# Altium schematic symbol library Vibration_Datalogger.SchLib: 75 symbols (part 6 of 7)
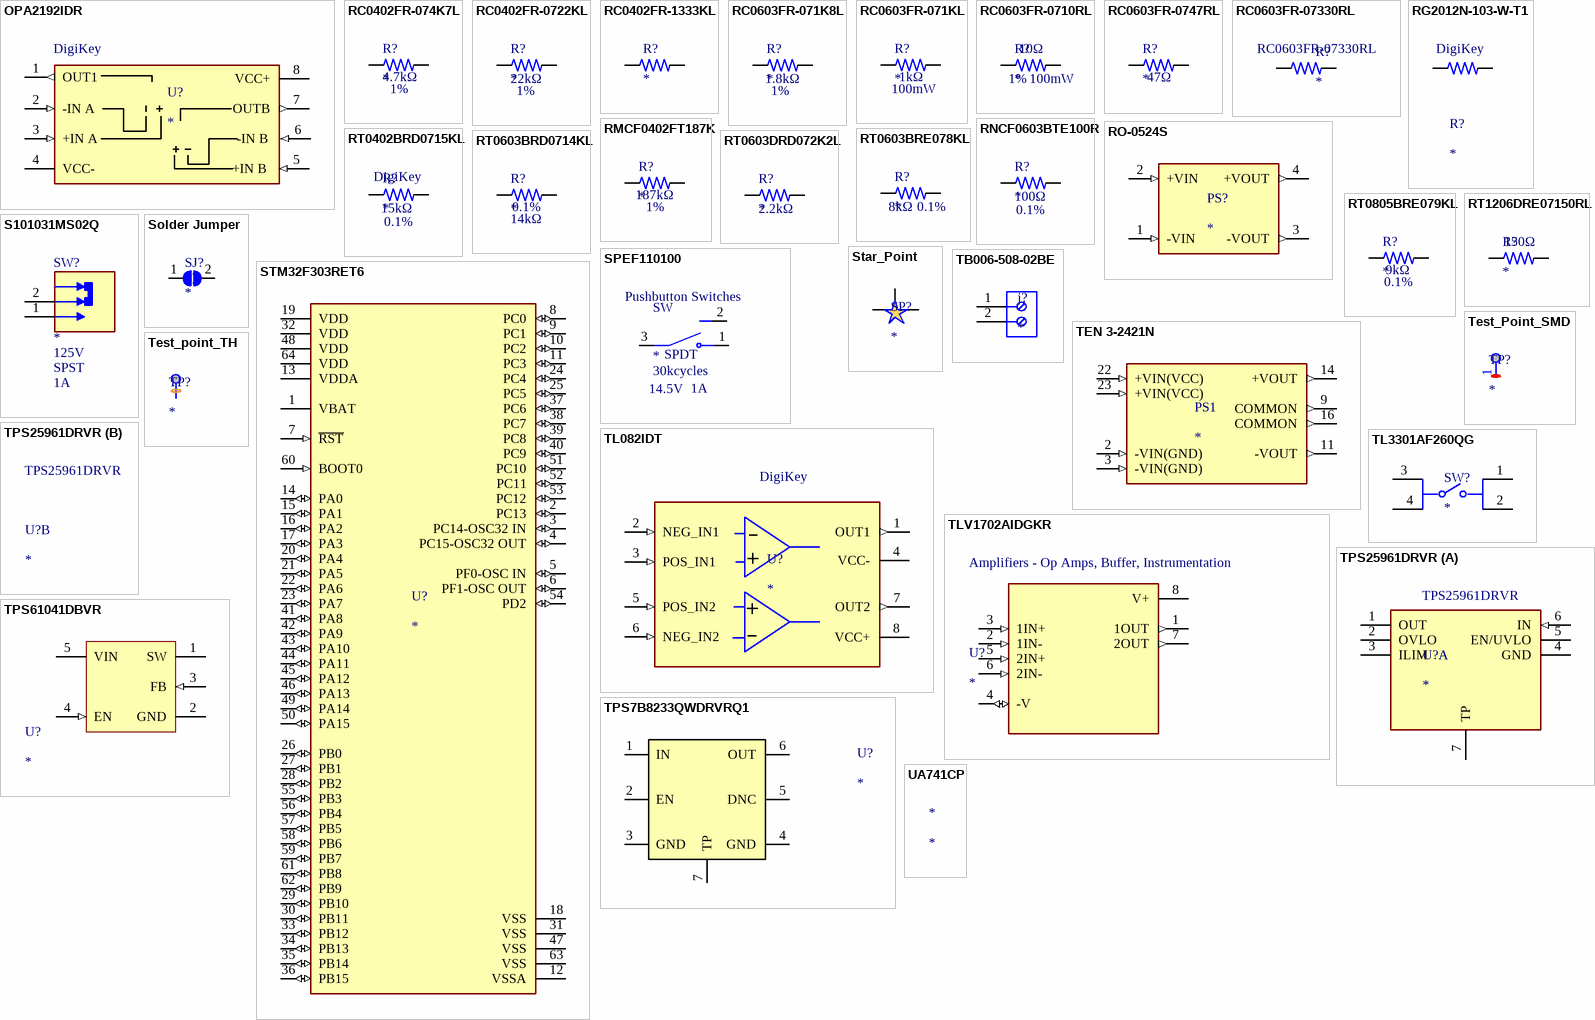
[diagram p6: symbols OPA2192IDR to UA741CP]

## RT0402BRD0715KL
designator R?  Resistance: 15kΩ  Tolerance: 0.1%  Supplier 1: DigiKey
RES SMD 15K OHM 0.1% 1/16W 0402; Max Power Dissipation: 63mW; Power Rating: 62.5mW; Temperature Coefficient: 25ppm/°C; Voltage Rating: 50V; Case/Package: 0402; Case Code (Imperial): 0402; China RoHS: Non-Compliant; Composition: Thin Film; Country of Origin: Mainland China; Depth: 500µm; Export Control Classification Number (ECCN) Code: EAR99; Features: Moisture Resistant; Height: 300µm; Harmonized Tariff Schedule (HTS) Code: 8533.21.00.30; Introduction Date: 2008-06-09; Lead Free: Lead Free; Length: 1mm; Lifecycle Status: Production; Max Operating Temperature: 155°C; Military Standard: Not; Min Operating Temperature: -55°C; Mount: Surface Mount; Number of Terminals: 2; Number of Terminations: 2; REACH SVHC: Yes; Schedule B: 8533210045, 8533210045|8533210045|8533210045|8533210045|8533210045; Termination: SMD/SMT; Voltage Rating (DC): 50V; Width: 500µm; Working Voltage: 50V; ComponentLink1URL: https://datasheet.octopart.com:443/RT0402BRD0715KL-Yageo-datasheet-176402239.pdf?src-supplier=Future+Electronics; ComponentLink1Description: https://datasheet.octopart.com:443/RT0402BRD0715KL-Yageo-datasheet-176402239.pdf?src-supplier=Future+Electronics; ComponentLink2URL: https://datasheet.octopart.com:443/RT0402BRD0715KL-Yageo-datasheet-169971040.pdf?src-supplier=Future+Electronics; ComponentLink2Description: https://datasheet.octopart.com:443/RT0402BRD0715KL-Yageo-datasheet-169971040.pdf?src-supplier=Future+Electronics; ComponentLink3URL: https://datasheet.octopart.com:443/RT0402BRD0715KL-Yageo-datasheet-166250672.pdf?src-supplier=Future+Electronics; ComponentLink3Description: https://datasheet.octopart.com:443/RT0402BRD0715KL-Yageo-datasheet-166250672.pdf?src-supplier=Future+Electronics; ComponentLink4URL: https://datasheet.octopart.com:443/RT0402BRD0715KL-Yageo-datasheet-136673517.pdf?src-supplier=Future+Electronics; ComponentLink4Description: https://datasheet.octopart.com:443/RT0402BRD0715KL-Yageo-datasheet-136673517.pdf?src-supplier=Future+Electronics; ComponentLink5URL: https://datasheet.octopart.com:443/RT0402BRD0715KL-Yageo-datasheet-137700930.pdf?src-supplier=Future+Electronics; ComponentLink5Description: https://datasheet.octopart.com:443/RT0402BRD0715KL-Yageo-datasheet-137700930.pdf?src-supplier=Future+Electronics; ComponentLink6URL: https://datasheet.octopart.com:443/RT0402BRD0715KL-Yageo-datasheet-41589729.pdf?src-supplier=Future+Electronics; ComponentLink6Description: https://datasheet.octopart.com:443/RT0402BRD0715KL-Yageo-datasheet-41589729.pdf?src-supplier=Future+Electronics; ComponentLink7URL: https://datasheet.octopart.com:443/RT0402BRD0715KL-Yageo-datasheet-12594463.pdf?src-supplier=Future+Electronics; ComponentLink7Description: https://datasheet.octopart.com:443/RT0402BRD0715KL-Yageo-datasheet-12594463.pdf?src-supplier=Future+Electronics; ComponentLink8URL: https://datasheet.octopart.com:443/RT0402BRD0715KL-Yageo-datasheet-10915759.pdf?src-supplier=Future+Electronics; ComponentLink8Description: https://datasheet.octopart.com:443/RT0402BRD0715KL-Yageo-datasheet-10915759.pdf?src-supplier=Future+Electronics; ComponentLink9URL: https://datasheet.octopart.com:443/RT0402BRD0715KL-Yageo-datasheet-34924148.pdf?src-supplier=Future+Electronics; ComponentLink9Description: https://datasheet.octopart.com:443/RT0402BRD0715KL-Yageo-datasheet-34924148.pdf?src-supplier=Future+Electronics; ComponentLink10URL: https://datasheet.octopart.com:443/RT0402BRD0715KL-Yageo-datasheet-96443642.pdf?src-supplier=Upverter; ComponentLink10Description: https://datasheet.octopart.com:443/RT0402BRD0715KL-Yageo-datasheet-96443642.pdf?src-supplier=Upverter; ComponentLink11URL: https://datasheet.octopart.com:443/RT0402BRD0715KL-Yageo-Group-datasheet-188167888.pdf?src-supplier=TME; ComponentLink11Description: https://datasheet.octopart.com:443/RT0402BRD0715KL-Yageo-Group-datasheet-188167888.pdf?src-supplier=TME; ComponentLink12URL: https://datasheet.octopart.com:443/RT0402BRD0715KL-Yageo-datasheet-164439670.pdf?src-supplier=Newark; ComponentLink12Description: https://datasheet.octopart.com:443/RT0402BRD0715KL-Yageo-datasheet-164439670.pdf?src-supplier=Newark; ComponentLink13URL: https://datasheet.octopart.com:443/RT0402BRD0715KL-Yageo-Group-datasheet-141265893.pdf?src-supplier=ODG+(Origin+Data+Global); ComponentLink13Description: https://datasheet.octopart.com:443/RT0402BRD0715KL-Yageo-Group-datasheet-141265893.pdf?src-supplier=ODG+(Origin+Data+Global); ComponentLink14URL: https://datasheet.octopart.com/RT0402BRD0715KL-Yageo-datasheet-86813807.pdf; ComponentLink14Description: https://datasheet.octopart.com/RT0402BRD0715KL-Yageo-datasheet-86813807.pdf; ComponentLink15URL: http://sigma.octopart.com:80/conflict_mineral_statement/Yageo-company-3.pdf?src-supplier=Compliance+Statements; ComponentLink15Description: http://sigma.octopart.com:80/conflict_mineral_statement/Yageo-company-3.pdf?src-supplier=Compliance+Statements; ComponentLink16URL: http://sigma.octopart.com:80/rohs_statement/Yageo-company-2.pdf?src-supplier=Compliance+Statements; ComponentLink16Description: http://sigma.octopart.com:80/rohs_statement/Yageo-company-2.pdf?src-supplier=Compliance+Statements
footprint RT0402BRD0715KL (RES SMD 15K OHM 0.1% 1/16W 0402)
pins: 1, 2

## RT0603BRD0714KL
designator R?  Tolerance: 0.1%  Resistance: 14kΩ
RES SMD 14K OHM 0.1% 1/10W 0603; Manufacturer: Yageo Group; Manufacturer Part Number: RT0603BRD0714KL; Max Power Dissipation: 100mW; Temperature Coefficient: 25ppm/°C; Voltage Rating: 75V; Voltage Rating (DC): 50V; Case/Package: 0603; Case Code (Imperial): 0603; China RoHS: Non-Compliant; Composition: Thin Film; Contact Plating: Tin; Country of Origin: Mainland China, Taiwan; Export Control Classification Number (ECCN) Code: EAR99; Features: Moisture Resistant; Height: 450µm; Harmonized Tariff Schedule (HTS) Code: 8533.21.00.30; Introduction Date: 2008-06-09; Lead Free: Lead Free; Length: 1.6mm; Lifecycle Status: Production; Max Operating Temperature: 155°C; Min Operating Temperature: -55°C; Mount: Surface Mount; Number of Terminals: 2; Number of Terminations: 2; Power Dissipation: 100mW; Power Rating: 100mW; Radiation Hardening: No; REACH SVHC: Yes; Schedule B: 8533210045, 8533210045|8533210045|8533210045|8533210045|8533210045; Termination: SMD/SMT; Width: 800µm; Working Voltage: 75V; ComponentLink1URL: https://datasheet.octopart.com:443/RT0603BRD0714KL-Yageo-datasheet-176402239.pdf?src-supplier=Future+Electronics; ComponentLink1Description: https://datasheet.octopart.com:443/RT0603BRD0714KL-Yageo-datasheet-176402239.pdf?src-supplier=Future+Electronics; ComponentLink2URL: https://datasheet.octopart.com:443/RT0603BRD0714KL-Yageo-datasheet-169971040.pdf?src-supplier=Future+Electronics; ComponentLink2Description: https://datasheet.octopart.com:443/RT0603BRD0714KL-Yageo-datasheet-169971040.pdf?src-supplier=Future+Electronics; ComponentLink3URL: https://datasheet.octopart.com:443/RT0603BRD0714KL-Yageo-datasheet-166250672.pdf?src-supplier=Future+Electronics; ComponentLink3Description: https://datasheet.octopart.com:443/RT0603BRD0714KL-Yageo-datasheet-166250672.pdf?src-supplier=Future+Electronics; ComponentLink4URL: https://datasheet.octopart.com:443/RT0603BRD0714KL-Yageo-datasheet-137700930.pdf?src-supplier=Future+Electronics; ComponentLink4Description: https://datasheet.octopart.com:443/RT0603BRD0714KL-Yageo-datasheet-137700930.pdf?src-supplier=Future+Electronics; ComponentLink5URL: https://datasheet.octopart.com:443/RT0603BRD0714KL-Yageo-datasheet-96443642.pdf?src-supplier=Upverter; ComponentLink5Description: https://datasheet.octopart.com:443/RT0603BRD0714KL-Yageo-datasheet-96443642.pdf?src-supplier=Upverter; ComponentLink6URL: https://datasheet.octopart.com:443/RT0603BRD0714KL-Yageo-Group-datasheet-188167888.pdf?src-supplier=TME; ComponentLink6Description: https://datasheet.octopart.com:443/RT0603BRD0714KL-Yageo-Group-datasheet-188167888.pdf?src-supplier=TME; ComponentLink7URL: https://datasheet.octopart.com/RT0603BRD0714KL-Yageo-datasheet-86813807.pdf; ComponentLink7Description: https://datasheet.octopart.com/RT0603BRD0714KL-Yageo-datasheet-86813807.pdf; ComponentLink8URL: http://sigma.octopart.com:80/conflict_mineral_statement/Yageo-company-3.pdf?src-supplier=Compliance+Statements; ComponentLink8Description: http://sigma.octopart.com:80/conflict_mineral_statement/Yageo-company-3.pdf?src-supplier=Compliance+Statements; ComponentLink9URL: http://sigma.octopart.com:80/rohs_statement/Yageo-company-2.pdf?src-supplier=Compliance+Statements; ComponentLink9Description: http://sigma.octopart.com:80/rohs_statement/Yageo-company-2.pdf?src-supplier=Compliance+Statements; Supplier 1: DigiKey; Supplier Part Number 1: YAG1531CT-ND; Category: Chip SMD Resistors
footprint RT0603BRD0714KL (RES SMD 14K OHM 0.1% 1/10W 0603)
pins: 1, 2

## RT0603BRE078KL
designator R?  Tolerance: 0.1%  Resistance: 8kΩ
RES SMD 8K OHM 0.1% 1/10W 0603; Manufacturer: Yageo Group; Manufacturer Part Number: RT0603BRE078KL; Max Power Dissipation: 100mW; Temperature Coefficient: 50ppm/°C; Voltage Rating: 75V; Case/Package: 0603; China RoHS: Non-Compliant; Composition: Thin Film; Features: Moisture Resistant; Height: 450µm; Length: 1.6mm; Lifecycle Status: Production; Max Operating Temperature: 155°C; Min Operating Temperature: -55°C; Mount: Surface Mount; Number of Terminals: 2; Number of Terminations: 2; Packaging: Tape & Reel; Power Dissipation: 100mW; Power Rating: 100mW; REACH SVHC: Yes; Width: 800µm; Working Voltage: 75V; ComponentLink1URL: https://datasheet.octopart.com:443/RT0603BRE078KL-Yageo-datasheet-176402239.pdf?src-supplier=IHS; ComponentLink1Description: https://datasheet.octopart.com:443/RT0603BRE078KL-Yageo-datasheet-176402239.pdf?src-supplier=IHS; ComponentLink2URL: https://datasheet.octopart.com:443/RT0603BRE078KL-Yageo-datasheet-137700930.pdf?src-supplier=IHS; ComponentLink2Description: https://datasheet.octopart.com:443/RT0603BRE078KL-Yageo-datasheet-137700930.pdf?src-supplier=IHS; ComponentLink3URL: https://datasheet.octopart.com:443/RT0603BRE078KL-Yageo-datasheet-169971040.pdf?src-supplier=Upverter; ComponentLink3Description: https://datasheet.octopart.com:443/RT0603BRE078KL-Yageo-datasheet-169971040.pdf?src-supplier=Upverter; ComponentLink4URL: https://sigma.octopart.com:443/138820526/technical_drawing/Yageo-RT0603BRE078KL.pdf?src-supplier=Upverter; ComponentLink4Description: https://sigma.octopart.com:443/138820526/technical_drawing/Yageo-RT0603BRE078KL.pdf?src-supplier=Upverter; ComponentLink5URL: https://datasheet.octopart.com:443/RT0603BRE078KL-Yageo-datasheet-164439670.pdf?src-supplier=Newark; ComponentLink5Description: https://datasheet.octopart.com:443/RT0603BRE078KL-Yageo-datasheet-164439670.pdf?src-supplier=Newark; ComponentLink6URL: https://datasheet.octopart.com/RT0603BRE078KL-Yageo-datasheet-86813807.pdf; ComponentLink6Description: https://datasheet.octopart.com/RT0603BRE078KL-Yageo-datasheet-86813807.pdf; ComponentLink7URL: http://sigma.octopart.com:80/conflict_mineral_statement/Yageo-company-3.pdf?src-supplier=Compliance+Statements; ComponentLink7Description: http://sigma.octopart.com:80/conflict_mineral_statement/Yageo-company-3.pdf?src-supplier=Compliance+Statements; ComponentLink8URL: http://sigma.octopart.com:80/rohs_statement/Yageo-company-2.pdf?src-supplier=Compliance+Statements; ComponentLink8Description: http://sigma.octopart.com:80/rohs_statement/Yageo-company-2.pdf?src-supplier=Compliance+Statements; Supplier 1: DigiKey; Supplier Part Number 1: 13-RT0603BRE078KLCT-ND; Category: Chip SMD Resistors
footprint RT0603BRE078KL (RES SMD 8K OHM 0.1% 1/10W 0603)
pins: 1, 2

## RT0603DRD072K2L
designator R?  Resistance: 2.2kΩ
RES SMD 2.2K OHM 0.5% 1/10W 0603; Manufacturer: Yageo Group; Manufacturer Part Number: RT0603DRD072K2L; Max Power Dissipation: 100mW; Temperature Coefficient: 25ppm/°C; Voltage Rating: 75V; Voltage Rating (DC): 50V; Case/Package: 0603; Case Code (Imperial): 0603; China RoHS: Non-Compliant; Composition: Thin Film; Features: Moisture Resistant; Height: 450µm; Lead Free: Lead Free; Length: 1.6mm; Lifecycle Status: Production; Max Operating Temperature: 155°C; Min Operating Temperature: -55°C; Mount: Surface Mount; Number of Terminals: 2; Number of Terminations: 2; Power Dissipation: 100mW; Power Rating: 100mW; REACH SVHC: Yes; Schedule B: 8533210045, 8533210045|8533210045, 8533210045|8533210045|8533210045, 8533210045|8533210045|8533210045|8533210045; Tolerance: 0.5%; Width: 800µm; Working Voltage: 75V; ComponentLink1URL: https://datasheet.octopart.com:443/RT0603DRD072K2L-Yageo-datasheet-176402239.pdf?src-supplier=Newark; ComponentLink1Description: https://datasheet.octopart.com:443/RT0603DRD072K2L-Yageo-datasheet-176402239.pdf?src-supplier=Newark; ComponentLink2URL: https://datasheet.octopart.com:443/RT0603DRD072K2L-Yageo-datasheet-96443642.pdf?src-supplier=Upverter; ComponentLink2Description: https://datasheet.octopart.com:443/RT0603DRD072K2L-Yageo-datasheet-96443642.pdf?src-supplier=Upverter; ComponentLink3URL: https://datasheet.octopart.com:443/RT0603DRD072K2L-Yageo-Group-datasheet-141265893.pdf?src-supplier=ODG+(Origin+Data+Global); ComponentLink3Description: https://datasheet.octopart.com:443/RT0603DRD072K2L-Yageo-Group-datasheet-141265893.pdf?src-supplier=ODG+(Origin+Data+Global); ComponentLink4URL: https://datasheet.octopart.com:443/RT0603DRD072K2L-Yageo-datasheet-68361100.pdf?src-supplier=Future+Electronics; ComponentLink4Description: https://datasheet.octopart.com:443/RT0603DRD072K2L-Yageo-datasheet-68361100.pdf?src-supplier=Future+Electronics; ComponentLink5URL: https://datasheet.octopart.com:443/RT0603DRD072K2L-Yageo-datasheet-41589729.pdf?src-supplier=Future+Electronics; ComponentLink5Description: https://datasheet.octopart.com:443/RT0603DRD072K2L-Yageo-datasheet-41589729.pdf?src-supplier=Future+Electronics; ComponentLink6URL: https://datasheet.octopart.com:443/RT0603DRD072K2L-Yageo-datasheet-12594463.pdf?src-supplier=Future+Electronics; ComponentLink6Description: https://datasheet.octopart.com:443/RT0603DRD072K2L-Yageo-datasheet-12594463.pdf?src-supplier=Future+Electronics; ComponentLink7URL: https://datasheet.octopart.com:443/RT0603DRD072K2L-Yageo-datasheet-34924148.pdf?src-supplier=Future+Electronics; ComponentLink7Description: https://datasheet.octopart.com:443/RT0603DRD072K2L-Yageo-datasheet-34924148.pdf?src-supplier=Future+Electronics; ComponentLink8URL: https://datasheet.octopart.com/RT0603DRD072K2L-Yageo-datasheet-86813807.pdf; ComponentLink8Description: https://datasheet.octopart.com/RT0603DRD072K2L-Yageo-datasheet-86813807.pdf; ComponentLink9URL: http://sigma.octopart.com:80/conflict_mineral_statement/Yageo-company-3.pdf?src-supplier=Compliance+Statements; ComponentLink9Description: http://sigma.octopart.com:80/conflict_mineral_statement/Yageo-company-3.pdf?src-supplier=Compliance+Statements; ComponentLink10URL: http://sigma.octopart.com:80/rohs_statement/Yageo-company-2.pdf?src-supplier=Compliance+Statements; ComponentLink10Description: http://sigma.octopart.com:80/rohs_statement/Yageo-company-2.pdf?src-supplier=Compliance+Statements; Supplier 1: DigiKey; Supplier Part Number 1: 311-2.2KDCT-ND; Category: Chip SMD Resistors
footprint RT0603DRD072K2L (RES SMD 2.2K OHM 0.5% 1/10W 0603)
pins: 1, 2

## RT0805BRE079KL
designator R?  Tolerance: 0.1%  Resistance: 9kΩ
RES SMD 9K OHM 0.1% 1/8W 0805; Manufacturer: Yageo Group; Manufacturer Part Number: RT0805BRE079KL; Max Power Dissipation: 125mW; Temperature Coefficient: 50ppm/°C; Working Voltage: 150V; Case/Package: 0805; China RoHS: Non-Compliant; Composition: Thin Film; Country of Origin: Mainland China, Taiwan; Export Control Classification Number (ECCN) Code: EAR99; Features: Moisture Resistant; Height: 609.6µm; Harmonized Tariff Schedule (HTS) Code: 8533.21.00.30; Introduction Date: 2017-09-12; Length: 2.0066mm; Lifecycle Status: Production; Max Operating Temperature: 155°C; Min Operating Temperature: -55°C; Mount: Surface Mount; Number of Terminals: 2; Number of Terminations: 2; Packaging: Tape & Reel; Power Dissipation: 125mW; REACH SVHC: Yes; Width: 1.2446mm; ComponentLink1URL: https://datasheet.octopart.com:443/RT0805BRE079KL-Yageo-datasheet-96443642.pdf?src-supplier=IHS; ComponentLink1Description: https://datasheet.octopart.com:443/RT0805BRE079KL-Yageo-datasheet-96443642.pdf?src-supplier=IHS; ComponentLink2URL: https://datasheet.octopart.com:443/RT0805BRE079KL-Yageo-datasheet-176402239.pdf?src-supplier=Future+Electronics; ComponentLink2Description: https://datasheet.octopart.com:443/RT0805BRE079KL-Yageo-datasheet-176402239.pdf?src-supplier=Future+Electronics; ComponentLink3URL: https://datasheet.octopart.com:443/RT0805BRE079KL-Yageo-datasheet-169971040.pdf?src-supplier=Future+Electronics; ComponentLink3Description: https://datasheet.octopart.com:443/RT0805BRE079KL-Yageo-datasheet-169971040.pdf?src-supplier=Future+Electronics; ComponentLink4URL: https://datasheet.octopart.com:443/RT0805BRE079KL-Yageo-datasheet-164439670.pdf?src-supplier=Future+Electronics; ComponentLink4Description: https://datasheet.octopart.com:443/RT0805BRE079KL-Yageo-datasheet-164439670.pdf?src-supplier=Future+Electronics; ComponentLink5URL: https://datasheet.octopart.com:443/RT0805BRE079KL-Yageo-Group-datasheet-141265893.pdf?src-supplier=ODG+(Origin+Data+Global); ComponentLink5Description: https://datasheet.octopart.com:443/RT0805BRE079KL-Yageo-Group-datasheet-141265893.pdf?src-supplier=ODG+(Origin+Data+Global); ComponentLink6URL: https://datasheet.octopart.com/RT0805BRE079KL-Yageo-datasheet-86813807.pdf; ComponentLink6Description: https://datasheet.octopart.com/RT0805BRE079KL-Yageo-datasheet-86813807.pdf; ComponentLink7URL: http://sigma.octopart.com:80/conflict_mineral_statement/Yageo-company-3.pdf?src-supplier=Compliance+Statements; ComponentLink7Description: http://sigma.octopart.com:80/conflict_mineral_statement/Yageo-company-3.pdf?src-supplier=Compliance+Statements; ComponentLink8URL: http://sigma.octopart.com:80/rohs_statement/Yageo-company-2.pdf?src-supplier=Compliance+Statements; ComponentLink8Description: http://sigma.octopart.com:80/rohs_statement/Yageo-company-2.pdf?src-supplier=Compliance+Statements; Supplier 1: DigiKey; Supplier Part Number 1: 13-RT0805BRE079KLCT-ND; Category: Chip SMD Resistors
footprint RT0805BRE079KL (RES SMD 9K OHM 0.1% 1/8W 0805)
pins: 1, 2

## RT1206DRE07150RL
designator R?  Resistance: 150Ω
RES SMD 150 OHM 0.5% 1/4W 1206; Manufacturer: Yageo Group; Manufacturer Part Number: RT1206DRE07150RL; Max Power Dissipation: 250mW; Temperature Coefficient: 50ppm/°C; Voltage Rating: 200V; Case/Package: 1206; Case Code (Imperial): 1206; Case Code (Metric): 3216; China RoHS: Non-Compliant; Composition: Thin Film; Depth: 1.6mm; Features: Moisture Resistant; Height: 550µm; Lead Free: Lead Free; Length: 3.1mm; Lifecycle Status: Production; Max Operating Temperature: 155°C; Military Standard: Not; Min Operating Temperature: -55°C; Mount: Surface Mount; Number of Terminals: 2; Number of Terminations: 2; Packaging: Tape & Reel (TR); Power Dissipation: 250mW; Power Rating: 250mW; REACH SVHC: Yes; Tolerance: 0.5%; Voltage Rating (DC): 200V; Width: 1.6mm; Working Voltage: 200V; ComponentLink1URL: https://datasheet.octopart.com:443/RT1206DRE07150RL-Yageo-datasheet-176402239.pdf?src-supplier=Newark; ComponentLink1Description: https://datasheet.octopart.com:443/RT1206DRE07150RL-Yageo-datasheet-176402239.pdf?src-supplier=Newark; ComponentLink2URL: https://datasheet.octopart.com:443/RT1206DRE07150RL-Yageo-datasheet-96443642.pdf?src-supplier=Upverter; ComponentLink2Description: https://datasheet.octopart.com:443/RT1206DRE07150RL-Yageo-datasheet-96443642.pdf?src-supplier=Upverter; ComponentLink3URL: https://datasheet.octopart.com/RT1206DRE07150RL-Yageo-datasheet-86813807.pdf; ComponentLink3Description: https://datasheet.octopart.com/RT1206DRE07150RL-Yageo-datasheet-86813807.pdf; ComponentLink4URL: http://sigma.octopart.com:80/conflict_mineral_statement/Yageo-company-3.pdf?src-supplier=Compliance+Statements; ComponentLink4Description: http://sigma.octopart.com:80/conflict_mineral_statement/Yageo-company-3.pdf?src-supplier=Compliance+Statements; ComponentLink5URL: http://sigma.octopart.com:80/rohs_statement/Yageo-company-2.pdf?src-supplier=Compliance+Statements; ComponentLink5Description: http://sigma.octopart.com:80/rohs_statement/Yageo-company-2.pdf?src-supplier=Compliance+Statements; Supplier 1: DigiKey; Supplier Part Number 1: 311-2965-1-ND; Category: Chip SMD Resistors
footprint RT1206DRE07150RL (RES SMD 150 OHM 0.5% 1/4W 1206)
pins: 1, 2

## S101031MS02Q
designator SW?  Max Voltage Rating (DC): 125V  Throw Configuration: SPST  Current Rating: 1A
Commutateurs à glissière SPST 6A PC TH AG; Manufacturer: C&K Components; Manufacturer Part Number: S101031MS02Q; Actuator Length: 8.51mm; Actuator Material: Nylon, Polyamide; Contact Voltage Rating (AC): 250V; Electrical Life: 10kcycles; Number of Positions: 1; Switch Function: On-Off; Switch Travel: 4.57mm; Contact Current Rating: 6A; Contact Material: Copper; Contact Plating: Silver; Country of Origin: Vietnam; Depth: 13.46mm; Export Control Classification Number (ECCN) Code: EAR99; Flammability Rating: UL94 V-2; Height: 7.11mm; Housing Material: Nylon; Harmonized Tariff Schedule (HTS) Code: 8536.50.90.50; Introduction Date: 2006-08-10; Length: 22.99mm; Lifecycle Status: Production; Max Current Rating: 1A; Max Operating Temperature: 65°C; Max Voltage Rating (AC): 250V; Min Operating Temperature: -30°C; Mount: Through Hole; REACH SVHC: Yes; Schedule B: 8536509050; Termination: Solder; Voltage Rating (AC): 125V; Voltage Rating (DC): 125V; ComponentLink1URL: https://datasheet.octopart.com:443/S101031MS02Q-C%26K-Components-datasheet-62111176.pdf?src-supplier=IHS; ComponentLink1Description: https://datasheet.octopart.com:443/S101031MS02Q-C%26K-Components-datasheet-62111176.pdf?src-supplier=IHS; ComponentLink2URL: https://datasheet.octopart.com:443/S101031MS02Q-C%26K-Components-datasheet-155330770.pdf?src-supplier=IHS; ComponentLink2Description: https://datasheet.octopart.com:443/S101031MS02Q-C%26K-Components-datasheet-155330770.pdf?src-supplier=IHS; ComponentLink3URL: https://datasheet.octopart.com:443/S101031MS02Q-ITT---Cannon-datasheet-123530.pdf?src-supplier=IHS; ComponentLink3Description: https://datasheet.octopart.com:443/S101031MS02Q-ITT---Cannon-datasheet-123530.pdf?src-supplier=IHS; ComponentLink4URL: https://datasheet.octopart.com:443/S101031MS02Q-C%26K-Components-datasheet-150821960.pdf?src-supplier=Sager+Electronics; ComponentLink4Description: https://datasheet.octopart.com:443/S101031MS02Q-C%26K-Components-datasheet-150821960.pdf?src-supplier=Sager+Electronics; ComponentLink5URL: https://datasheet.octopart.com:443/S101031MS02Q-C%26K-Components-datasheet-17018678.pdf?src-supplier=Electro+Sonic; ComponentLink5Description: https://datasheet.octopart.com:443/S101031MS02Q-C%26K-Components-datasheet-17018678.pdf?src-supplier=Electro+Sonic; ComponentLink6URL: https://datasheet.octopart.com:443/S101031MS02Q-C%26K-Components-datasheet-11546994.pdf?src-supplier=_legacy+Avnet; ComponentLink6Description: https://datasheet.octopart.com:443/S101031MS02Q-C%26K-Components-datasheet-11546994.pdf?src-supplier=_legacy+Avnet; ComponentLink7URL: http://sigma.octopart.com:80/reach_statement/ITT-company-18.pdf?src-supplier=Compliance+Statements; ComponentLink7Description: http://sigma.octopart.com:80/reach_statement/ITT-company-18.pdf?src-supplier=Compliance+Statements; Supplier 1: DigiKey; Supplier Part Number 1: CKN10658-ND; Category: Slide Switches
footprint S101031MS02Q (Commutateurs à glissière SPST 6A PC TH AG)
pins: 1, 2

## Solder Jumper
designator SJ?  (no BOM)
footprint Solder Jumper
pins: 1 SJ1, 2 SJ2

## SPEF110100
designator SW  Electrical Life: 30kcycles  Voltage Rating (DC): 14.5V  Throw Configuration: SPDT  Current Rating: 1A  Category: Pushbutton Switches
Switch Push Button N.O./N.C. SPDT Square Plunger 1A 14.5VDC Latching Bracket Mount/Through Hole PC Pins Automotive Bulk; Manufacturer: ALPS; Manufacturer Part Number: SPEF110100; Actuator Length: 5.0038mm; Contact Resistance: 100mΩ; Insulation Resistance: 3MΩ; Operating Force: 3N; Voltage Rating (AC): 100V; Export Control Classification Number (ECCN) Code: EAR99; Height: 6.9mm; Harmonized Tariff Schedule (HTS) Code: 8536.50.70.00; Introduction Date: 2015-04-16; Length: 9.398mm; Lifecycle Status: Production; Max Current Rating: 1A; Max Operating Temperature: 85°C; Max Voltage Rating (DC): 14.5V; Min Operating Temperature: -40°C; Mount: Bushing; Radiation Hardening: No; Termination: Solder; ComponentLink1URL: https://datasheet.octopart.com:443/SPEF110100-ALPS-datasheet-182234832.pdf?src-supplier=IHS; ComponentLink1Description: https://datasheet.octopart.com:443/SPEF110100-ALPS-datasheet-182234832.pdf?src-supplier=IHS; ComponentLink2URL: https://datasheet.octopart.com:443/SPEF110100-ALPS-datasheet-182235328.pdf?src-supplier=IHS; ComponentLink2Description: https://datasheet.octopart.com:443/SPEF110100-ALPS-datasheet-182235328.pdf?src-supplier=IHS; Supplier 1: Mouser; Supplier Part Number 1: 688-SPEF110100
footprint SPEF110100 (1.5mm-travel Vertical Type SPEF Series)
pins: 1, 2, 3 c

## Star_Point
designator SP?
Star Point , permet de relier plusieurs masse à une seule
footprint Star_Point
pins: 1, 2, 3

## STM32F303RET6
designator U?
IC MCU 32BIT 512KB FLASH 64LQFP; Manufacturer: STMicroelectronics; Manufacturer Part Number: STM32F303RET6; ADC Channels (Resolution): 22-Ch 12-Bit; Core Architecture: ARM Cortex-M4; DAC Channels (Resolution): 2-Ch 12-Bit; Data Bus Width: 32b; EEPROM Memory Size: 0B; Frequency: 72MHz; Interface: CAN, IrDA, LIN, SMBus, USB; Max Frequency: 32MHz; Max Junction Temperature (Tj): 105°C; Max Supply Current: 76.9mA; Max Supply Voltage: 3.6V; Min Supply Voltage: 2V; Nominal Supply Current: 2µA; Number of A/D Converters: 4; Number of ADC Channels: 22; Number of D/A Converters: 2; Number of I2C Channels: 3; Number of I/Os: 51; Number of PWM Channels: 31; Number of Timers/Counters: 1; Operating Supply Voltage: 3.3V; Oscillator Type: Internal; Peripherals: POR; RAM Size: 64kB; Description: MCU 32-bit ARM Cortex M4 RISC 512KB Flash 2.5V/3.3V 64-Pin LQFP Frame; Ambient Temperature Range High: 85°C; Case/Package: LFQFP; China RoHS: Compliant; Country of Origin: Mainland China; Export Control Classification Number (ECCN) Code: 3A991.A.2; Flash Memory Size: 512kB; Height: 1.6mm; Height - Seated (Max): 1.6mm; Harmonized Tariff Schedule (HTS) Code: 8542.31.00.25; Introduction Date: 2015-03-03; Lead Free: Lead Free; Length: 10mm; Lifecycle Status: Production; Max Operating Temperature: 85°C; Memory Size: 512kB; Memory Type: FLASH; Min Operating Temperature: -40°C; Mount: Surface Mount; Number of Channels: 22; Number of Pins: 64; Number of SPI Channels: 3; Number of Terminals: 64; Number of UART Channels: 2; Number of USART Channels: 3; Number of USB Channels: 1; REACH SVHC: Yes; Schedule B: 8542310000; Temperature Grade: Industrial; Terminal Pitch: 500µm; Weight: 342.689036mg; Width: 10mm; ComponentLink1URL: https://datasheet.octopart.com:443/STM32F303RET6-STMicroelectronics-datasheet-68303033.pdf?src-supplier=IHS; ComponentLink1Description: https://datasheet.octopart.com:443/STM32F303RET6-STMicroelectronics-datasheet-68303033.pdf?src-supplier=IHS; ComponentLink2URL: https://datasheet.octopart.com:443/STM32F303RET6-STMicroelectronics-datasheet-61689937.pdf?src-supplier=STMicroelectronics; ComponentLink2Description: https://datasheet.octopart.com:443/STM32F303RET6-STMicroelectronics-datasheet-61689937.pdf?src-supplier=STMicroelectronics; ComponentLink3URL: https://datasheet.octopart.com:443/STM32F303RET6-STMicroelectronics-datasheet-37090231.pdf?src-supplier=STMicroelectronics; ComponentLink3Description: https://datasheet.octopart.com:443/STM32F303RET6-STMicroelectronics-datasheet-37090231.pdf?src-supplier=STMicroelectronics; ComponentLink4URL: https://datasheet.octopart.com:443/STM32F303RET6-STMicroelectronics-datasheet-43912984.pdf?src-supplier=element14+APAC; ComponentLink4Description: https://datasheet.octopart.com:443/STM32F303RET6-STMicroelectronics-datasheet-43912984.pdf?src-supplier=element14+APAC; ComponentLink5URL: https://datasheet.octopart.com:443/STM32F303RET6-STMicroelectronics-datasheet-37697013.pdf?src-supplier=Newark; ComponentLink5Description: https://datasheet.octopart.com:443/STM32F303RET6-STMicroelectronics-datasheet-37697013.pdf?src-supplier=Newark; ComponentLink6URL: https://datasheet.octopart.com:443/STM32F303RET6-STMicroelectronics-datasheet-37143350.pdf?src-supplier=Farnell; ComponentLink6Description: https://datasheet.octopart.com:443/STM32F303RET6-STMicroelectronics-datasheet-37143350.pdf?src-supplier=Farnell; ComponentLink7URL: https://datasheet.octopart.com:443/STM32F303RET6-STMicroelectronics-datasheet-136987017.pdf?src-supplier=TME; ComponentLink7Description: https://datasheet.octopart.com:443/STM32F303RET6-STMicroelectronics-datasheet-136987017.pdf?src-supplier=TME; Category: Microcontrollers; Nominal Supply Voltage (DC): 3.3V; Supplier 1: DigiKey; Supplier Part Number 1: 497-15163-ND
footprint STM32F303RET6
pins: 1 VBAT (power), 2 PC13 (io), 3 PC14-OSC32 IN (io), 4 PC15-OSC32 OUT (io), 5 PF0-OSC IN (io), 6 PF1-OSC OUT (io), 7 ~{RST} (in), 8 PC0 (io), 9 PC1 (io), 10 PC2 (io), 11 PC3 (io), 12 VSSA (power), 13 VDDA (power), 14 PA0 (io), 15 PA1 (io), 16 PA2 (io), 17 PA3 (io), 18 VSS (power), 19 VDD (power), 20 PA4 (io), 21 PA5 (io), 22 PA6 (io), 23 PA7 (io), 24 PC4 (io), 25 PC5 (io), 26 PB0 (io), 27 PB1 (io), 28 PB2 (io), 29 PB10 (io), 30 PB11 (io), 31 VSS (power), 32 VDD (power), 33 PB12 (io), 34 PB13 (io), 35 PB14 (io), 36 PB15 (io), 37 PC6 (io), 38 PC7 (io), 39 PC8 (io), 40 PC9 (io), 41 PA8 (io), 42 PA9 (io), 43 PA10 (io), 44 PA11 (io), 45 PA12 (io), 46 PA13 (io), 47 VSS (power), 48 VDD (power), 49 PA14 (io), 50 PA15 (io), 51 PC10 (io), 52 PC11 (io), 53 PC12 (io), 54 PD2 (io), 55 PB3 (io), 56 PB4 (io), 57 PB5 (io), 58 PB6 (io), 59 PB7 (io), 60 BOOT0 (in), 61 PB8 (io), 62 PB9 (io), 63 VSS (power), 64 VDD (power)

## TB006-508-02BE
designator j?
TERMINAL BLOCK, SCREW TYPE, 5.08; Manufacturer: Same Sky; Manufacturer Part Number: TB006-508-02BE; Approvals: CE, EN, IEC, UL, cUL; Current Rating: 12A; Number of Contacts: 2; Number of Levels: 1; Pitch: 5.08mm; Voltage Rating: 300V; Wire/Cable Gauge: 14AWG; Color: Blue; Export Control Classification Number (ECCN) Code: EAR99; Height: 10mm; Harmonized Tariff Schedule (HTS) Code: 8536.90.40.00; Introduction Date: 2024-10-09; Lifecycle Status: Production; Max Operating Temperature: 105°C; Min Operating Temperature: -40°C; Mount: Screw; Number of Rows: 1; Orientation: Horizontal; Width: 8.2mm; ComponentLink1URL: https://datasheet.octopart.com:443/TB006-508-02BE-Same-Sky-datasheet-181920258.pdf?src-supplier=Same+Sky; ComponentLink1Description: https://datasheet.octopart.com:443/TB006-508-02BE-Same-Sky-datasheet-181920258.pdf?src-supplier=Same+Sky; ComponentLink2URL: https://datasheet.octopart.com:443/TB006-508-02BE-CUI-Devices-datasheet-175928139.pdf?src-supplier=Same+Sky; ComponentLink2Description: https://datasheet.octopart.com:443/TB006-508-02BE-CUI-Devices-datasheet-175928139.pdf?src-supplier=Same+Sky; ComponentLink3URL: https://datasheet.octopart.com:443/TB006-508-02BE-CUI-Devices-datasheet-144794960.pdf?src-supplier=Same+Sky; ComponentLink3Description: https://datasheet.octopart.com:443/TB006-508-02BE-CUI-Devices-datasheet-144794960.pdf?src-supplier=Same+Sky; ComponentLink4URL: https://datasheet.octopart.com:443/TB006-508-02BE-CUI-Devices-datasheet-180438495.pdf?src-supplier=IHS; ComponentLink4Description: https://datasheet.octopart.com:443/TB006-508-02BE-CUI-Devices-datasheet-180438495.pdf?src-supplier=IHS; ComponentLink5URL: https://datasheet.octopart.com:443/TB006-508-02BE-Same-Sky-datasheet-182881446.pdf?src-supplier=Electro+Sonic; ComponentLink5Description: https://datasheet.octopart.com:443/TB006-508-02BE-Same-Sky-datasheet-182881446.pdf?src-supplier=Electro+Sonic; ComponentLink6URL: https://datasheet.octopart.com:443/TB006-508-02BE-CUI-Devices-datasheet-154730747.pdf?src-supplier=Electro+Sonic; ComponentLink6Description: https://datasheet.octopart.com:443/TB006-508-02BE-CUI-Devices-datasheet-154730747.pdf?src-supplier=Electro+Sonic; ComponentLink7URL: https://datasheet.octopart.com:443/TB006-508-02BE-CUI-Devices-datasheet-175927972.pdf?src-supplier=CUI+Devices+SCT; ComponentLink7Description: https://datasheet.octopart.com:443/TB006-508-02BE-CUI-Devices-datasheet-175927972.pdf?src-supplier=CUI+Devices+SCT; ComponentLink8URL: https://datasheet.octopart.com:443/TB006-508-02BE-CUI-Devices-datasheet-142371922.pdf?src-supplier=Future+Electronics; ComponentLink8Description: https://datasheet.octopart.com:443/TB006-508-02BE-CUI-Devices-datasheet-142371922.pdf?src-supplier=Future+Electronics; ComponentLink9URL: https://datasheet.octopart.com:443/TB006-508-02BE-Same-Sky-datasheet-182050254.pdf?src-supplier=Future+Electronics; ComponentLink9Description: https://datasheet.octopart.com:443/TB006-508-02BE-Same-Sky-datasheet-182050254.pdf?src-supplier=Future+Electronics; ComponentLink10URL: https://datasheet.octopart.com:443/TB006-508-02BE-CUI-Devices-datasheet-175928504.pdf?src-supplier=Future+Electronics; ComponentLink10Description: https://datasheet.octopart.com:443/TB006-508-02BE-CUI-Devices-datasheet-175928504.pdf?src-supplier=Future+Electronics; ComponentLink11URL: https://datasheet.octopart.com:443/TB006-508-02BE-CUI-Devices-datasheet-147843966.pdf?src-supplier=Future+Electronics; ComponentLink11Description: https://datasheet.octopart.com:443/TB006-508-02BE-CUI-Devices-datasheet-147843966.pdf?src-supplier=Future+Electronics; ComponentLink12URL: https://datasheet.octopart.com:443/TB006-508-02BE-Same-Sky-datasheet-189105716.pdf?src-supplier=Master+Electronics; ComponentLink12Description: https://datasheet.octopart.com:443/TB006-508-02BE-Same-Sky-datasheet-189105716.pdf?src-supplier=Master+Electronics; ComponentLink13URL: https://octopart.com:443/opatz8j6/c1?t=eFP0t1yMaer5fqXOBA3T788EVBF2GhNaKgPx7eLDiSRWPs3i5FaaEo9hjRkJ1KR7kDo8Aa7uuq8_Hr5VZR8Kf-2nnqYIqREL74NJxUI33P7zlikLvuxbkgHx79VDMbjJjpU6XCJoSZDxyAndI7ChSK84purJZaZgHBoRoP8ZZ4ejXKJg6DiAz0h3Ggok9yr3JUod9PbTgV5Rq2Jkm_jGnl78MRGghpRZ-ERHe9DeJK7A1iftOrnJV_vershSpBy0ctayIIa2UmSCv67YDiY1De6DPgqIHqtcEQA3m7sIllNhj54H4f6Zx-9HD44VkeGfU_qseDbAq9PtnEfUcVX03lqslG2liGjIG-ou_fIA&src-supplier=Compliance+Statements; ComponentLink13Description: https://octopart.com:443/opatz8j6/c1?t=eFP0t1yMaer5fqXOBA3T788EVBF2GhNaKgPx7eLDiSRWPs3i5FaaEo9hjRkJ1KR7kDo8Aa7uuq8_Hr5VZR8Kf-2nnqYIqREL74NJxUI33P7zlikLvuxbkgHx79VDMbjJjpU6XCJoSZDxyAndI7ChSK84purJZaZgHBoRoP8ZZ4ejXKJg6DiAz0h3Ggok9yr3JUod9PbTgV5Rq2Jkm_jGnl78MRGghpRZ-ERHe9DeJK7A1iftOrnJV_vershSpBy0ctayIIa2UmSCv67YDiY1De6DPgqIHqtcEQA3m7sIllNhj54H4f6Zx-9HD44VkeGfU_qseDbAq9PtnEfUcVX03lqslG2liGjIG-ou_fIA&src-supplier=Compliance+Statements; ComponentLink14URL: https://octopart.com:443/opatz8j6/c1?t=eQXU25om79Mg7i_sc7vmaQUPv77M4JGPhOFRWgBv8hLO2y81gGWxbNJlsyCNOqNxLkqNphBztY6g9-w_FHlTwXYeR5ap3gbLgvssa-HqjKraM2eE-5AhTbcjk8cwv8McGs54kCOyk22YrOjspopvLulwE37c-kDx3_f-_RG9iEILM8oD-c7KhExr9da662TLQ3QDoM-_4-8eYMZVAy8bjOPw4Fmix2vZEkLfqUoFkFCxzXVk7oooo-keoqirMZele-W4jTsBOJG7FqCEoN-gSw8YJblTVjAtO0RSLFxf1XIgLH-qeC1H0fXxg3YlDl_jUtLLeJKXoe-V1xQQIpOocKGOlGAArD2oY9MfPdlkCPJ5dg&src-supplier=Compliance+Statements; ComponentLink14Description: https://octopart.com:443/opatz8j6/c1?t=eQXU25om79Mg7i_sc7vmaQUPv77M4JGPhOFRWgBv8hLO2y81gGWxbNJlsyCNOqNxLkqNphBztY6g9-w_FHlTwXYeR5ap3gbLgvssa-HqjKraM2eE-5AhTbcjk8cwv8McGs54kCOyk22YrOjspopvLulwE37c-kDx3_f-_RG9iEILM8oD-c7KhExr9da662TLQ3QDoM-_4-8eYMZVAy8bjOPw4Fmix2vZEkLfqUoFkFCxzXVk7oooo-keoqirMZele-W4jTsBOJG7FqCEoN-gSw8YJblTVjAtO0RSLFxf1XIgLH-qeC1H0fXxg3YlDl_jUtLLeJKXoe-V1xQQIpOocKGOlGAArD2oY9MfPdlkCPJ5dg&src-supplier=Compliance+Statements; ComponentLink15URL: https://octopart.com:443/opatz8j6/c1?t=wRmJeZsFFpgldaQkFQEDz9TSai1lhMJuCHXTj1jyRUN-8JflpGK8oe4bKLGF3HD-Pdyt_Tc6CN9GVb85udjq_tMu_zS_j5OYSqy_wUeKJPdlntQAS2h7Si8Hm3IldBLwvHyMXDQjjbPMTvS_IO7RCPy3bp7-NW2cEdzDq6Q_MlsFxP0xiGuiAbjOvgNtQ26tRMImPOwgInzz_ugkJ9p-YHxRQulE3iOIBNFRa4_A23rOY7N1d6yeZsFvFpuV24PXxnWZBUCPW8MQcoPWcw1zc9AcnasklS4kkMraZ_BPS8oJxNtpmk2RcySc8Yyv1lg1JJ3xzOJ7g3ouVZnU97WDAVEmoYsAJFib10Krj5Ss&src-supplier=Compliance+Statements; ComponentLink15Description: https://octopart.com:443/opatz8j6/c1?t=wRmJeZsFFpgldaQkFQEDz9TSai1lhMJuCHXTj1jyRUN-8JflpGK8oe4bKLGF3HD-Pdyt_Tc6CN9GVb85udjq_tMu_zS_j5OYSqy_wUeKJPdlntQAS2h7Si8Hm3IldBLwvHyMXDQjjbPMTvS_IO7RCPy3bp7-NW2cEdzDq6Q_MlsFxP0xiGuiAbjOvgNtQ26tRMImPOwgInzz_ugkJ9p-YHxRQulE3iOIBNFRa4_A23rOY7N1d6yeZsFvFpuV24PXxnWZBUCPW8MQcoPWcw1zc9AcnasklS4kkMraZ_BPS8oJxNtpmk2RcySc8Yyv1lg1JJ3xzOJ7g3ouVZnU97WDAVEmoYsAJFib10Krj5Ss&src-supplier=Compliance+Statements; ComponentLink16URL: https://octopart.com:443/opatz8j6/c1?t=X54lqXNjkslOELOtDFIXMhQTd50ePpFJ87e_egYh8y7jL-MQ37lZtC_H4zll1wASSPVoP6LwhASq5mHW7YPTVx4GiS39fiGzaTaT0cUBMmLu8zfZGCv6PxtrNCpgCUXeI2nVGyVHn84SmoYnogNMAsuNhGWZupU3odoPeLTA_ESBhomhZ6DApfpimQiYZlrC4UGZpCdssswlmRHqrEElLsyROkpw4fyJ5p2tbpQbrdiaQHIAxAwcu1SkeRvCM1ifALumDH-Z4UwI9oWdVT3fukVVyRmzXXvJf_LtRKFPGtW0sL4aHz2K3jLcD-uYjSR65sHBiqxHLVnr4nMbZwuwW8Ybu5kFob-1rTUE7yx-ItBT1w&src-supplier=Compliance+Statements; ComponentLink16Description: https://octopart.com:443/opatz8j6/c1?t=X54lqXNjkslOELOtDFIXMhQTd50ePpFJ87e_egYh8y7jL-MQ37lZtC_H4zll1wASSPVoP6LwhASq5mHW7YPTVx4GiS39fiGzaTaT0cUBMmLu8zfZGCv6PxtrNCpgCUXeI2nVGyVHn84SmoYnogNMAsuNhGWZupU3odoPeLTA_ESBhomhZ6DApfpimQiYZlrC4UGZpCdssswlmRHqrEElLsyROkpw4fyJ5p2tbpQbrdiaQHIAxAwcu1SkeRvCM1ifALumDH-Z4UwI9oWdVT3fukVVyRmzXXvJf_LtRKFPGtW0sL4aHz2K3jLcD-uYjSR65sHBiqxHLVnr4nMbZwuwW8Ybu5kFob-1rTUE7yx-ItBT1w&src-supplier=Compliance+Statements; Supplier 1: DigiKey; Supplier Part Number 1: 102-6191-ND; Category: Terminal Blocks
footprint TB006-508-02BE (Borniers fixes Terminal block, screw type, 5.08)
pins: 1, 2

## TEN 3-2421N
designator PS1
DC DC CONVERTER +/-5V 2.5W; Manufacturer: Traco Power; Manufacturer Part Number: TEN 3-2421N; Current - Output 1: 250mA; Efficiency: 80%; Isolation Voltage: 1.5kV; Max Input Voltage: 36V; Max Output Voltage: 5.1V; Min Input Voltage: 18V; Min Output Voltage: 4.9V; Nominal Input Voltage: 24V; Nominal Output Voltage: 5V; Number of Circuits: 1; Number of Outputs: 2; Output Power: 3W; Voltage - Output 2: -5V; Country of Origin: Taiwan; Current - Output 2: 250mA; Depth: 10.2mm; Export Control Classification Number (ECCN) Code: EAR99; Height: 10.2mm; Height - Seated (Max): 10.7mm; Introduction Date: 2014-03-11; Length: 31.8mm; Lifecycle Status: Production; Max Operating Temperature: 70°C; Max Output Current: 250mA; Max Output Power: 2.5W; Min Operating Temperature: -40°C; Mount: Through Hole; Number of Terminals: 8; Output Current: 250mA; Output Voltage: 5V; REACH SVHC: No; Terminal Pitch: 2.54mm; Voltage - Output 1: 5V; Weight: 12.8g; Width: 20.3mm; ComponentLink1URL: https://datasheet.octopart.com:443/TEN-3-2421N-Tracopower-datasheet-137325533.pdf?src-supplier=Sager+Power+Systems; ComponentLink1Description: https://datasheet.octopart.com:443/TEN-3-2421N-Tracopower-datasheet-137325533.pdf?src-supplier=Sager+Power+Systems; ComponentLink2URL: https://datasheet.octopart.com:443/TEN-3-2421N-Tracopower-datasheet-63587155.pdf?src-supplier=TME; ComponentLink2Description: https://datasheet.octopart.com:443/TEN-3-2421N-Tracopower-datasheet-63587155.pdf?src-supplier=TME; ComponentLink3URL: https://datasheet.octopart.com:443/TEN-3-2421N-Tracopower-datasheet-41570544.pdf?src-supplier=Newark; ComponentLink3Description: https://datasheet.octopart.com:443/TEN-3-2421N-Tracopower-datasheet-41570544.pdf?src-supplier=Newark; ComponentLink4URL: https://datasheet.octopart.com:443/TEN-3-2421N-Traco-Power-datasheet-164884015.pdf?src-supplier=Burklin+Elektronik; ComponentLink4Description: https://datasheet.octopart.com:443/TEN-3-2421N-Traco-Power-datasheet-164884015.pdf?src-supplier=Burklin+Elektronik; Category: Board Mount Modules
footprint TEN 3-2421N (DC DC CONVERTER +/-5V 2.5W)
pins: 2 -VIN(GND) (in), 3 -VIN(GND) (in), 9 COMMON (out), 11 -VOUT (out), 14 +VOUT (out), 16 COMMON (out), 22 +VIN(VCC) (in), 23 +VIN(VCC) (in)

## Test_Point_SMD
designator TP?
footprint Test_point_SMD
pins: 1

## Test_point_TH
designator TP?
footprint Test_Point_TH
pins: 1

## TL082IDT
designator U?  Supplier 1: DigiKey
J-FET Amplifier 2 Circuit - 8-SOIC; Manufacturer: STMicroelectronics; Manufacturer Part Number: TL082IDT; Bandwidth: 4MHz; Common Mode Rejection Ratio: 80dB; Input Bias Current: 200pA; Input Offset Voltage (Vos): 13mV; Max Dual Supply Voltage: 18V; Max Power Dissipation: 680mW; Max Supply Current: 2.5mA; Min Dual Supply Voltage: 3V; Min Supply Voltage: 6V; Nominal Supply Current: 1.4mA; Number of Amplifiers: 2; Operating Supply Voltage: 15V; Output Current: 40mA; Slew Rate: 8V/µs; Voltage Gain: 106.02dB; Case/Package: SO; China RoHS: Compliant; Contact Plating: Tin; Country of Origin: Mainland China, Morocco; Export Control Classification Number (ECCN) Code: EAR99; Gain Bandwidth Product: 4MHz; Height: 1.25mm; Height - Seated (Max): 1.75mm; Harmonized Tariff Schedule (HTS) Code: 8542.33.00.01; Introduction Date: 1980-01-04; Length: 4.9mm; Lifecycle Status: Production; Max Operating Temperature: 105°C; Max Supply Voltage: 18V; Min Operating Temperature: -40°C; Mount: Surface Mount; Number of Channels: 2; Number of Circuits: 2; Number of Elements: 2; Number of Pins: 8; Number of Terminals: 2; Operating Supply Current: 1.4mA; Output Current per Channel: 40mA; Packaging: Tape and Reel; Power Dissipation: 680mW; Radiation Hardening: No; REACH SVHC: Yes; Schedule B: 8542330000, 8542330000|8542330000|8542330000|8542330000|8542330000|8542330000|8542330000|8542330000|8542330000|8542330000|8542330000|8542330000|8542330000|8542330000|8542330000|8542330000|8542330000|8542330000|8542330000|8542330000|8542330000|8542330000|8542330000|85; Temperature Grade: Industrial; Terminal Pitch: 1.27mm; Unity Gain Bandwidth Product: 4MHz; Width: 3.9mm; ComponentLink1URL: https://datasheet.octopart.com:443/TL082IDT-STMicroelectronics-datasheet-68295580.pdf?src-supplier=Newark; ComponentLink1Description: https://datasheet.octopart.com:443/TL082IDT-STMicroelectronics-datasheet-68295580.pdf?src-supplier=Newark; ComponentLink2URL: https://datasheet.octopart.com:443/TL082IDT-STMicroelectronics-datasheet-10692279.pdf?src-supplier=Newark; ComponentLink2Description: https://datasheet.octopart.com:443/TL082IDT-STMicroelectronics-datasheet-10692279.pdf?src-supplier=Newark; ComponentLink3URL: https://datasheet.octopart.com:443/TL082IDT-STMicroelectronics-datasheet-37002800.pdf?src-supplier=element14+APAC; ComponentLink3Description: https://datasheet.octopart.com:443/TL082IDT-STMicroelectronics-datasheet-37002800.pdf?src-supplier=element14+APAC; ComponentLink4URL: https://datasheet.octopart.com:443/TL082IDT-STMicroelectronics-datasheet-5315494.pdf?src-supplier=STMicroelectronics; ComponentLink4Description: https://datasheet.octopart.com:443/TL082IDT-STMicroelectronics-datasheet-5315494.pdf?src-supplier=STMicroelectronics; ComponentLink5URL: https://datasheet.octopart.com:443/TL082IDT-STMicroelectronics-datasheet-20031.pdf?src-supplier=Sierra+IC; ComponentLink5Description: https://datasheet.octopart.com:443/TL082IDT-STMicroelectronics-datasheet-20031.pdf?src-supplier=Sierra+IC; ComponentLink6URL: https://datasheet.octopart.com:443/TL082IDT-STMicroelectronics-datasheet-14138407.pdf?src-supplier=iiiC; ComponentLink6Description: https://datasheet.octopart.com:443/TL082IDT-STMicroelectronics-datasheet-14138407.pdf?src-supplier=iiiC; Supplier Part Number 1: 497-2214-1-ND; Category: Amplifiers - Op Amps, Buffer, Instrumentation
footprint TL082IDT (J-FET Amplifier 2 Circuit - 8-SOIC)
pins: 1 OUT1 (out), 2 NEG_IN1 (in), 3 POS_IN1 (in), 4 VCC- (power), 5 POS_IN2 (in), 6 NEG_IN2 (in), 7 OUT2 (out), 8 VCC+ (power)

## TL3301AF260QG
designator SW?
SWITCH TACTILE SPST-NO 0.05A 12V; Actuator Length: 1.4mm; Actuator Material: Nylon, Polyamide; Contact Resistance: 100mΩ; Current Rating: 50mA; Electrical Life: 100kcycles; Illumination Type: Illuminated, Non-Illuminated; Number of Positions: 1; Operating Force: 2.55N; Switch Function: Off-Mom; Switch Travel: 250µm; Throw Configuration: SPST; China RoHS: Compliant; Color: Beige; Contact Material: Silver; Contact Plating: Silver; Export Control Classification Number (ECCN) Code: EAR99; Height: 3.6mm; Housing Material: Nylon; Harmonized Tariff Schedule (HTS) Code: 8536.50.90.40; Insulation Resistance: 100MΩ; Introduction Date: 2002-10-30; Lead Free: Lead Free; Length: 6mm; Lifecycle Status: Production; Max Current Rating: 50mA; Max Operating Temperature: 70°C; Max Voltage Rating (DC): 12V; Mechanical Life: 100kcycles; Min Operating Temperature: -40°C; Mount: Surface Mount; Orientation: Straight; REACH SVHC: Yes; Termination: Gull Wing; Voltage Rating (DC): 12V; ComponentLink1URL: https://datasheet.octopart.com:443/TL3301AF260QG-E-Switch-datasheet-165859977.pdf?src-supplier=Future+Electronics; ComponentLink1Description: https://datasheet.octopart.com:443/TL3301AF260QG-E-Switch-datasheet-165859977.pdf?src-supplier=Future+Electronics; ComponentLink2URL: https://datasheet.octopart.com:443/TL3301AF260QG-E-Switch-datasheet-32479546.pdf?src-supplier=Future+Electronics; ComponentLink2Description: https://datasheet.octopart.com:443/TL3301AF260QG-E-Switch-datasheet-32479546.pdf?src-supplier=Future+Electronics; ComponentLink3URL: https://datasheet.octopart.com:443/TL3301AF260QG-E-Switch-datasheet-26831008.pdf?src-supplier=Future+Electronics; ComponentLink3Description: https://datasheet.octopart.com:443/TL3301AF260QG-E-Switch-datasheet-26831008.pdf?src-supplier=Future+Electronics; ComponentLink4URL: https://datasheet.octopart.com:443/TL3301AF260QG-E-Switch-datasheet-8331992.pdf?src-supplier=Future+Electronics; ComponentLink4Description: https://datasheet.octopart.com:443/TL3301AF260QG-E-Switch-datasheet-8331992.pdf?src-supplier=Future+Electronics; ComponentLink5URL: https://datasheet.octopart.com:443/TL3301AF260QG-E-Switch-datasheet-500121.pdf?src-supplier=Farnell; ComponentLink5Description: https://datasheet.octopart.com:443/TL3301AF260QG-E-Switch-datasheet-500121.pdf?src-supplier=Farnell; ComponentLink6URL: https://datasheet.octopart.com:443/TL3301AF260QG-E-Switch-datasheet-100437263.pdf?src-supplier=Farnell; ComponentLink6Description: https://datasheet.octopart.com:443/TL3301AF260QG-E-Switch-datasheet-100437263.pdf?src-supplier=Farnell; ComponentLink7URL: https://datasheet.octopart.com:443/TL3301AF260QG-E-Switch-datasheet-140258799.pdf?src-supplier=LKR; ComponentLink7Description: https://datasheet.octopart.com:443/TL3301AF260QG-E-Switch-datasheet-140258799.pdf?src-supplier=LKR; ComponentLink8URL: https://datasheet.octopart.com:443/TL3301AF260QG-E-Switch-datasheet-27847350.pdf?src-supplier=Master+Electronics; ComponentLink8Description: https://datasheet.octopart.com:443/TL3301AF260QG-E-Switch-datasheet-27847350.pdf?src-supplier=Master+Electronics; ComponentLink9URL: https://datasheet.octopart.com:443/TL3301AF260QG-E-Switch-datasheet-155463340.pdf?src-supplier=TME; ComponentLink9Description: https://datasheet.octopart.com:443/TL3301AF260QG-E-Switch-datasheet-155463340.pdf?src-supplier=TME
footprint TL3301AF260QG (SWITCH TACTILE SPST-NO 0.05A 12V)
pins: 1, 2, 3, 4